# Altium footprint library NFC.PcbLib: 31 footprints (part 2 of 2)
Each footprint in its own frame and in the unit in brackets; x right, y up, seen from the top. Pads: shape width x height; smd on the part's side, far side on the other; paste and mask are expansions set on the pad; w line width, h text height; cw(c..) or ccw(c..) is an arc to the next point about the centre after c.
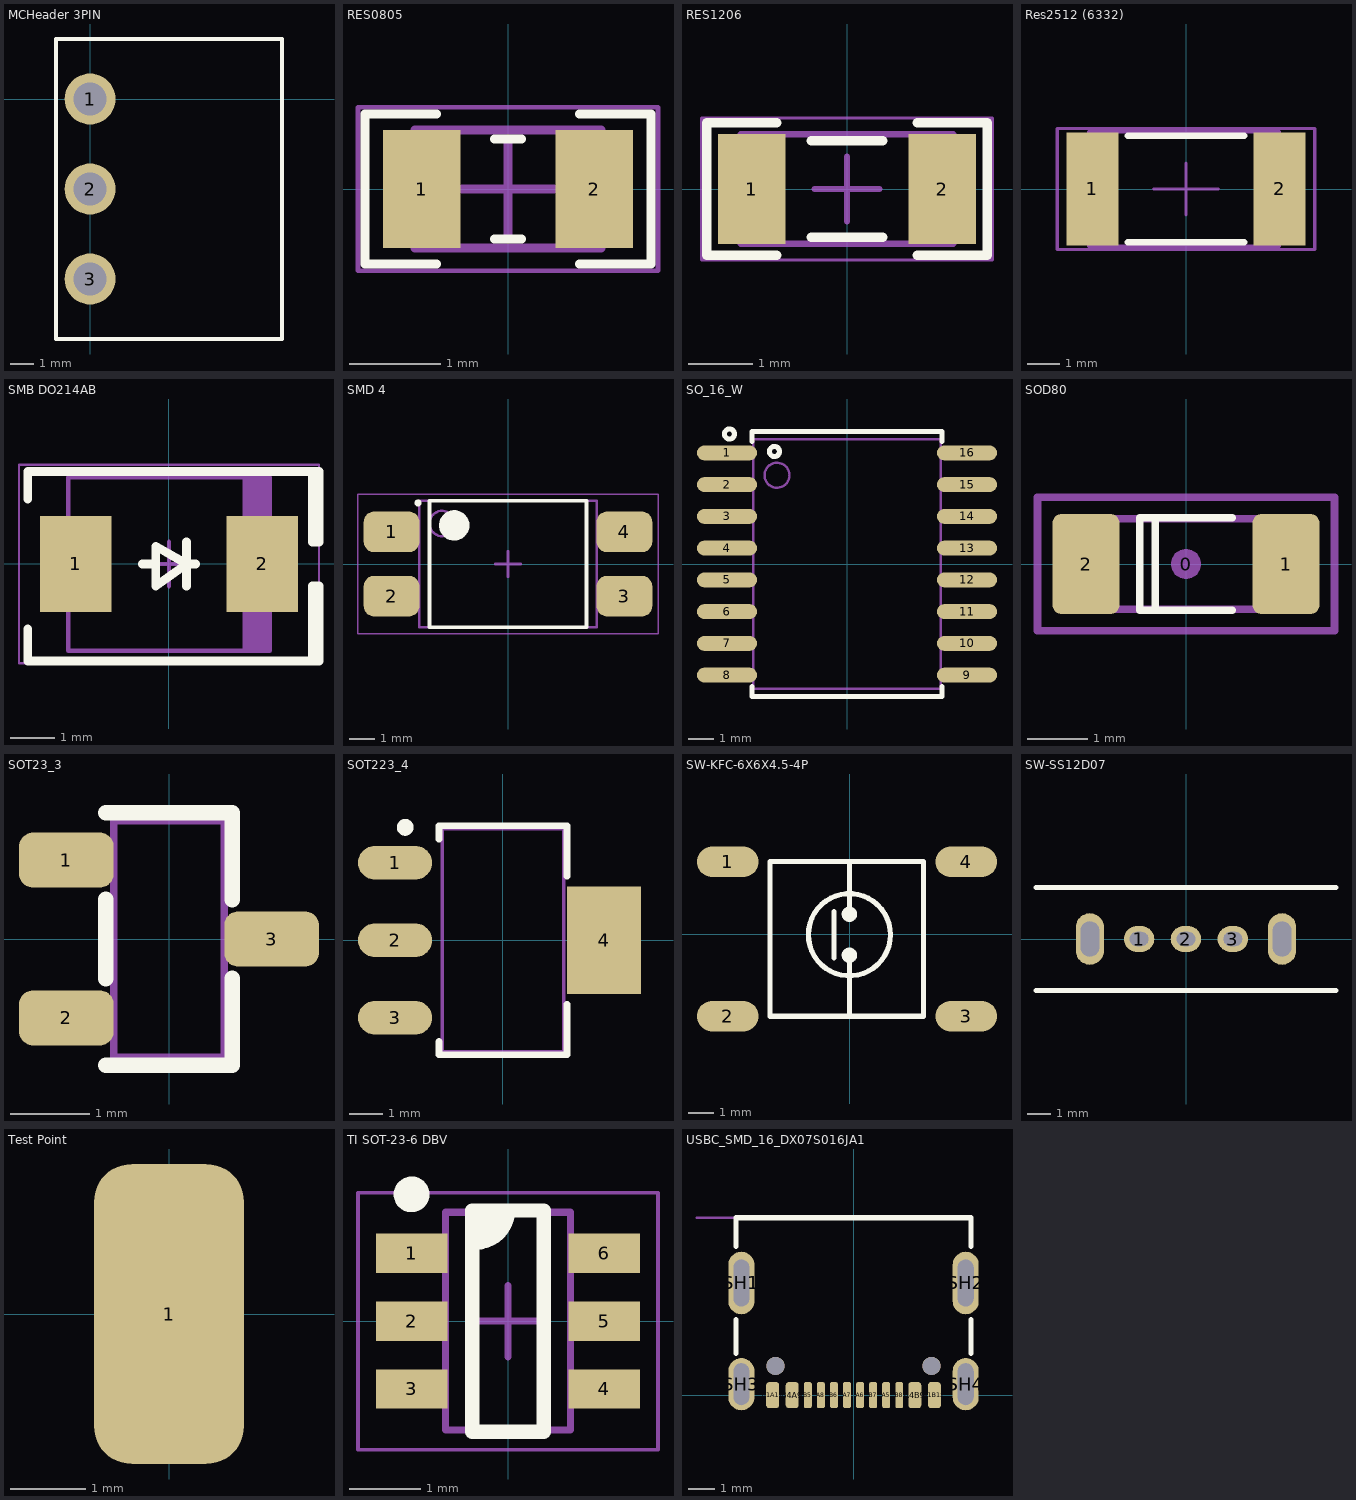
[diagram p1: the footprints below, top view; thin cyan lines are the x and y axes]

## MCHeader 3PIN [mil]
pads (3):
  round 85 hole 55: 1(0,0) 2(0,-150) 3(0,-300)
Top Overlay:
  lines w7: -57,-400 320,-400 320,100 -57,100 -57,-400
3D body "mini combicon header 3pin.STEP": height 292.32, standoff -130.12, extent -46.09,-399 318.09,97.85

## RES0805 [mm] "Chip Resistor, 2-Leads, Body 2/00x1/25mm, IPC Medium Density DESIGNER:ABBAS BASEREH"
height 0.5
pads (2):
  rect 0.85x1.3 smd: 1(-0.95,0) 2(0.95,0)
Top Overlay:
  lines w0.1: -0.788,-0.825 -1.575,-0.825 -1.575,0.825 -0.788,0.825 ; -0.15,-0.55 0.15,-0.55 ; -0.15,0.55 0.15,0.55 ; 0.788,-0.825 1.575,-0.825 1.575,0.825 0.788,0.825
Mechanical 13:
  lines w0.1: -1.025,-0.65 -1.025,0.65 1.025,0.65 1.025,-0.65 -1.025,-0.65
Mechanical 15:
  lines w0.05: -1.65,-0.9 -1.65,0.9 1.65,0.9 1.65,-0.9 -1.65,-0.9
  lines w0.1: -0.5,0 0.5,0 ; 0,-0.5 0,0.5
3D body "RES0805.step": height 0.5, standoff 0, extent -1.025,-0.65 1.025,0.65

## RES1206 [mm] "Chip Resistor, 2-Leads, Body 3/20x1/60mm, IPC Medium Density DESIGNER:ABBAS BASEREH"
height 0.94
pads (2):
  rect 1.05x1.7 smd: 1(-1.475,0) 2(1.475,0)
Top Overlay:
  lines w0.15: -1.088,-1.025 -2.175,-1.025 -2.175,1.025 -1.088,1.025 ; -0.55,-0.75 0.55,-0.75 ; -0.55,0.75 0.55,0.75 ; 1.088,-1.025 2.175,-1.025 2.175,1.025 1.088,1.025
Mechanical 13:
  lines w0.1: -1.65,-0.85 -1.65,0.85 1.65,0.85 1.65,-0.85 -1.65,-0.85
Mechanical 15:
  lines w0.05: -2.25,-1.1 -2.25,1.1 2.25,1.1 2.25,-1.1 -2.25,-1.1
  lines w0.1: -0.5,0 0.5,0 ; 0,-0.5 0,0.5
3D body "RES1206.step": height 0.94, standoff 0, extent -1.65,-0.85 1.65,0.85

## Res2512 (6332) [mm]
pads (2):
  rect 1.6x3.5 smd: 1(-2.9,0) 2(2.9,0)
Top Overlay:
  lines w0.2: -1.8,-1.65 1.8,-1.65 ; -1.8,1.65 1.8,1.65
Mechanical 13:
  lines w0.1: -3.023,-1.778 2.896,-1.778 2.896,1.778 -3.023,1.778 -3.023,-1.778
Mechanical 15:
  lines w0.1: -1,0 1,0 ; 0,-0.8 0,0.8 ; -3.988,-1.88 3.988,-1.88 3.988,1.88 -3.988,1.88 -3.988,-1.88
3D body "User Library-RESC6432X06.STEP": height 0.6, standoff 0, extent -3.2,-1.6 3.2,1.6

## SMB DO214AB [mm] "Molded Diode, 2-Leads, Body 4.31x3.62mm, IPC Medium Density"
height 2.44
pads (2):
  rect 1.62x2.18 smd: 1(-2.11,0) 2(2.11,0)
Top Overlay:
  lines w0.2: -3.2,-1.475 -3.2,-2.2 3.25,-2.2 ; -3.2,1.475 -3.2,2.1 3.4,2.1 3.4,0.5 3.25,0.5 3.25,2.1 ; -0.6,0 -0.3,0 ; 0.4,-0.5 0.4,0.5 ; 0.6,0 0.4,0 ; 0.4,0 -0.3,0.4 -0.3,-0.5 0.4,0 ; 3.25,-2.2 3.4,-2.2 3.4,-0.5 3.25,-0.5 3.25,-2.2
Mechanical 13:
  rectangle: 1.67,-1.97 2.285,1.97
  lines w0.1: -2.285,-1.97 2.285,-1.97 2.285,1.97 -2.285,1.97 -2.285,-1.97
Mechanical 15:
  lines w0.05: -3.4,-2.25 3.4,-2.25 3.4,2.25 -3.4,2.25 -3.4,-2.25
  lines w0.1: -0.5,0 0.5,0 ; 0,-0.5 0,0.5
3D body "SMB.STEP": height 2.4, standoff 0, extent -2.6,-1.8 2.6,1.8

## SMD 4 [mm] "SOP, 4-Leads, Body 4/65x6/75mm, Pitch 2/54mm, IPC Medium Density designer:abbas basereh"
height 3.5
pads (4):
  rrect50% 2.2x1.6 smd mask+0.06: 1(-4.6,1.27) 2(-4.6,-1.27) 3(4.6,-1.27) 4(4.6,1.27)
Top Overlay:
  circle w0.127: c-3.556,2.413 r0.076
  circle w0.6: c-2.125,1.525 r0.3
  lines w0.15: -3.1,-2.5 -3.1,2.5 3.1,2.5 3.1,-2.5 -3.1,-2.5
Mechanical 13:
  circle w0.1: c-2.6,1.6 r0.5
  lines w0.1: -3.5,-2.5 -3.5,2.5 3.5,2.5 3.5,-2.5 -3.5,-2.5
Mechanical 15:
  lines w0.05: -5.925,-2.75 -5.925,2.75 5.925,2.75 5.925,-2.75 -5.925,-2.75
  lines w0.1: -0.5,0 0.5,0 ; 0,-0.5 0,0.5
3D body "User Library-PC817_Gullwing.STEP": height 3.89, standoff 0.04, extent -5,-2.29 5,2.29

## SO_16_W [mm] "SOP, SOIC, 7.5mm width, 1.27mm pitch,"
height 2
pads (16):
  oval 2.4x0.6 smd: 1(-4.8,4.445) 2(-4.8,3.175) 3(-4.8,1.905) 4(-4.8,0.635) 5(-4.8,-0.635) 6(-4.8,-1.905) 7(-4.8,-3.175) 8(-4.8,-4.445) 9(4.8,-4.445) 10(4.8,-3.175) 11(4.8,-1.905) 12(4.8,-0.635) 13(4.8,0.635) 14(4.8,1.905) 15(4.8,3.175) 16(4.8,4.445)
Top Overlay:
  circle w0.2: c-4.7,5.2 r0.2
  circle w0.2: c-2.9,4.5 r0.2
  lines w0.2: -3.8,-4.9 -3.8,-5.3 3.8,-5.3 3.8,-4.9 ; -3.8,4.9 -3.8,5.3 3.8,5.3 3.8,4.9
Mechanical 13:
  circle w0.1: c-2.8,3.55 r0.5
  lines w0.1: -3.75,-5 -3.75,5 3.75,5 3.75,-5 -3.75,-5
3D body "User Library-SOIC16_Wide_JEDEC_MS-013AA.step": height 2.62, standoff -0.03, extent -5.215,-5.25 5.415,5.25

## SOD80 [mm] "Diode, MiniMELF"
height 1.6
pads (3):
  round 0.5 on Mech15: 0(0,0)
  rrect25% 1.1x1.65 smd: 1(1.65,0) 2(-1.65,0)
Top Overlay:
  lines w0.127: -0.508,-0.762 -0.508,0.762 ; 0.762,-0.762 -0.762,-0.762 -0.762,0.762 0.762,0.762
Mechanical 13:
  lines w0.127: -1.8,-0.747 1.8,-0.747 1.8,0.747 -1.8,0.747 -1.8,-0.747
Mechanical 15:
  lines w0.127: -2.45,-1.1 2.45,-1.1 2.45,1.1 -2.45,1.1 -2.45,-1.1
3D body "User Library-SOD-80.STEP": height 1.6, standoff 0, extent -1.88,-0.8 1.82,0.8

## SOT23_3 [mm] "SOT-23, Micro3, MO-178, TO-236AB, MO-193C, SuperSOT3, SC-59, 1.5x3mm, Pitch 1.9mm"
height 2
pads (3):
  rrect50% 1.2x0.7 smd paste-0.05 mask+0.1: 1(-1.3,1) 2(-1.3,-1) 3(1.3,0)
Top Overlay:
  lines w0.2: -0.8,-1.6 0.8,-1.6 0.8,-0.5 ; -0.8,-0.5 -0.8,0.5 ; -0.8,1.6 0.8,1.6 0.8,0.5
Mechanical 13:
  lines w0.1: -0.7,-1.5 0.7,-1.5 0.7,1.5 -0.7,1.5 -0.7,-1.5
3D body "User Library-SOT23-2.STEP": height 1.08, standoff 0, extent -1.32,-1.5 1.32,1.5

## SOT223_4 [mm] "SOT223, 4-Leads, Body 6.5x3.5mm, Pitch 2.30mm"
height 1.8
pads (4):
  oval 2.2x1 smd: 1(-3.2,2.3) 2(-3.2,0) 3(-3.2,-2.3)
  rect 2.2x3.2 smd paste-5: 4(3,0)
Top Overlay:
  circle w0.25: c-2.9,3.35 r0.125
  lines w0.2: -1.9,-3 -1.9,-3.4 1.9,-3.4 1.9,-1.9 ; -1.9,3 -1.9,3.4 1.9,3.4 1.9,1.9
Top Paste:
  rectangle: 2.1,0.2 3.9,1.4
  rectangle: 2.1,-1.4 3.9,-0.2
Mechanical 13:
  lines w0.1: -1.8,-3.3 -1.8,3.3 1.8,3.3 1.8,-3.3 -1.8,-3.3
3D body "User Library-SOT223-3.step": height 1.7, standoff 0, extent -3.5,-3.25 3.5,3.25

## SW-KFC-6X6X4.5-4P [mm]
pads (4):
  oval 2.4x1.2 smd mask+0.1: 1(-4.75,2.819) 2(-4.75,-3.2) 3(4.547,-3.2) 4(4.547,2.819)
Top Overlay:
  circle w0.2: c-0.008,-0.023 r1.6
  circle w0.2: c-0.008,0.777 r0.2
  circle w0.2: c-0.008,-0.823 r0.2
  lines w0.2: -0.608,-0.923 -0.608,0.877 ; -0.008,-3.15 -0.008,-0.823 ; -0.008,0.777 -0.008,2.769 ; -3.099,-3.2 -3.099,2.835 2.888,2.835 2.888,-3.2 -3.099,-3.2
3D body "82574 tact switch.stp": height 5, standoff -5.08, extent -3.22,-3.296 3.015,2.933

## SW-SS12D07 [mm]
pads (5):
  oval 1.3x1.1 hole 0.6 slot 0.8 at 0 deg: 1(-2.002,0) 2(-0.002,0) 3(1.998,0)
  oval 1.2x2.2 hole 0.8 slot 1.5 at 90 deg: ""(-4.102,0) ""(4.098,0)
Top Overlay:
  lines w0.2: -6.401,-2.2 6.399,-2.2 ; -6.4,2.2 6.4,2.2
3D body "SS-12D07-L5-B  C480345 8.6MM Switch.STEP": height 9.5, standoff -2.9, extent -4.302,-2.25 4.298,2.25

## Test Point [mm]
height 2.8
pads (1):
  rrect50% 2x4 smd: 1(0,0)

## TI SOT-23-6 DBV [mm] "SOT23, 6-Leads, Body 2.90x2.80mm, Pitch 0.95mm, IPC Medium Density"
height 1.45
pads (6):
  rect 1x0.55 smd: 1(-1.35,0.95) 2(-1.35,0) 3(-1.35,-0.95) 4(1.35,-0.95) 5(1.35,0) 6(1.35,0.95)
Top Overlay:
  circle w0.25: c-1.35,1.775 r0.125
  region: -0.5,1.55 0,1.55 0,1.4 -0.3,1.1 -0.5,1.1
  lines w0.2: -0.5,1.1 -0.45,1.1 ccw(c-0.45,1.55) 0,1.55 ; -0.5,-1.55 -0.5,1.55 0.5,1.55 0.5,-1.55 -0.5,-1.55
Mechanical 13:
  lines w0.1: -0.875,-1.525 0.875,-1.525 0.875,1.525 -0.875,1.525 -0.875,-1.525
Mechanical 15:
  lines w0.05: -2.1,-1.8 2.1,-1.8 2.1,1.8 -2.1,1.8 -2.1,-1.8
  lines w0.1: -0.5,0 0.5,0 ; 0,-0.5 0,0.5
3D body "sot-23-6-vishay.STEP": height 1.45, standoff 0, extent -1.436,-1.525 1.435,1.525

## USBC_SMD_16_DX07S016JA1 [mm] "CONN, USB, Type C, DX07S016JA1, popular*"
height 3.31
pads (18):
  rrect50% 0.5x1 smd mask+0.075: A1B12(3.1,0) A4B9(2.35,0) B1A12(-3.1,0) B4A9(-2.35,0)
  rrect50% 0.3x1 smd mask+0.075: A5(1.25,0) A6(0.25,0) A7(-0.25,0) A8(-1.25,0) B5(-1.75,0) B6(-0.75,0) B7(0.75,0) B8(1.75,0)
  oval 1x2.4 hole 0.6 slot 1.8 at 90 deg: SH1(-4.3,4.3) SH2(4.3,4.3)
  oval 1x2 hole 0.6 slot 1.6 at 90 deg: SH3(-4.3,0.42) SH4(4.3,0.42)
  round 0.7 hole 0.7 unplated: ""(-2.99,1.12) ""(2.99,1.12)
Top Overlay:
  lines w0.2: -4.5,1.6 -4.5,2.9 ; -4.5,5.7 -4.5,6.8 4.5,6.8 4.5,5.7 ; 4.5,1.6 4.5,2.9
Mechanical 13:
  lines w0.1: -6,6.8 -4,6.8
3D body "DX07S016JA1.STEP": height 3.18, standoff -0.88, extent -4.47,-0.2 4.47,6.7